# Altium footprint library Diodo_SMD.PcbLib: 1 footprints
Each footprint in its own frame and in the unit in brackets; x right, y up, seen from the top. Pads: shape width x height; smd on the part's side, far side on the other; paste and mask are expansions set on the pad; w line width, h text height; cw(c..) or ccw(c..) is an arc to the next point about the centre after c.
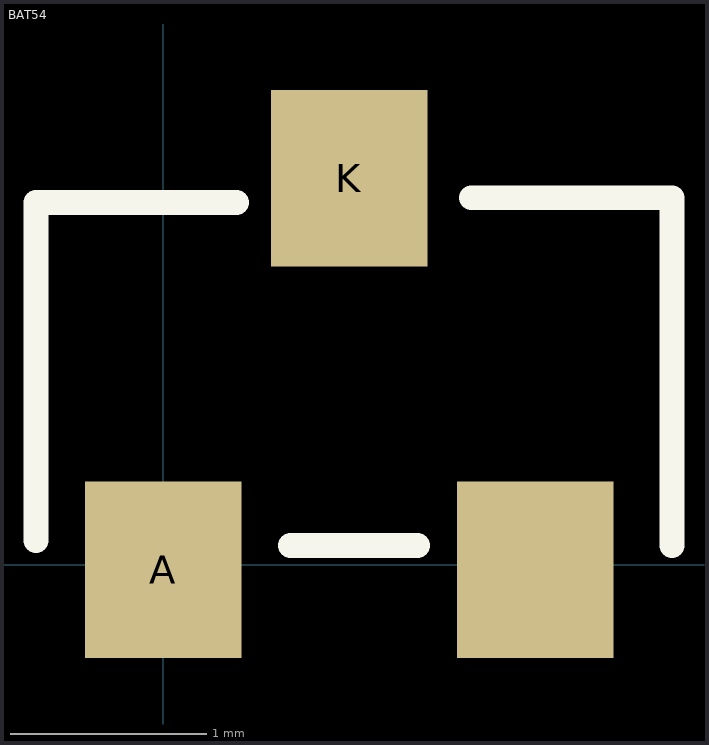
[diagram p0: the footprint, top view; thin cyan lines are the x and y axes]

## BAT54 [mm] "SOT23-3"
pads (3):
  rect 0.8x0.9 smd: A(0,-0.025) K(0.95,1.975) ""(1.9,-0.025)
Top Overlay:
  lines w0.127: -0.65,0.125 -0.65,1.85 0.375,1.85 ; 0.65,0.1 1.3,0.1 ; 1.575,1.875 2.6,1.875 2.6,0.1
3D body "CircuitWorks-SOT-23.step": height 1.08, standoff -0.02, extent -0.525,-0.275 2.475,2.225